# Altium footprint library Ezlo.PcbLib: 103 footprints (part 7 of 7)
Each footprint in its own frame and in the unit in brackets; x right, y up, seen from the top. Pads: shape width x height; smd on the part's side, far side on the other; paste and mask are expansions set on the pad; w line width, h text height; cw(c..) or ccw(c..) is an arc to the next point about the centre after c.
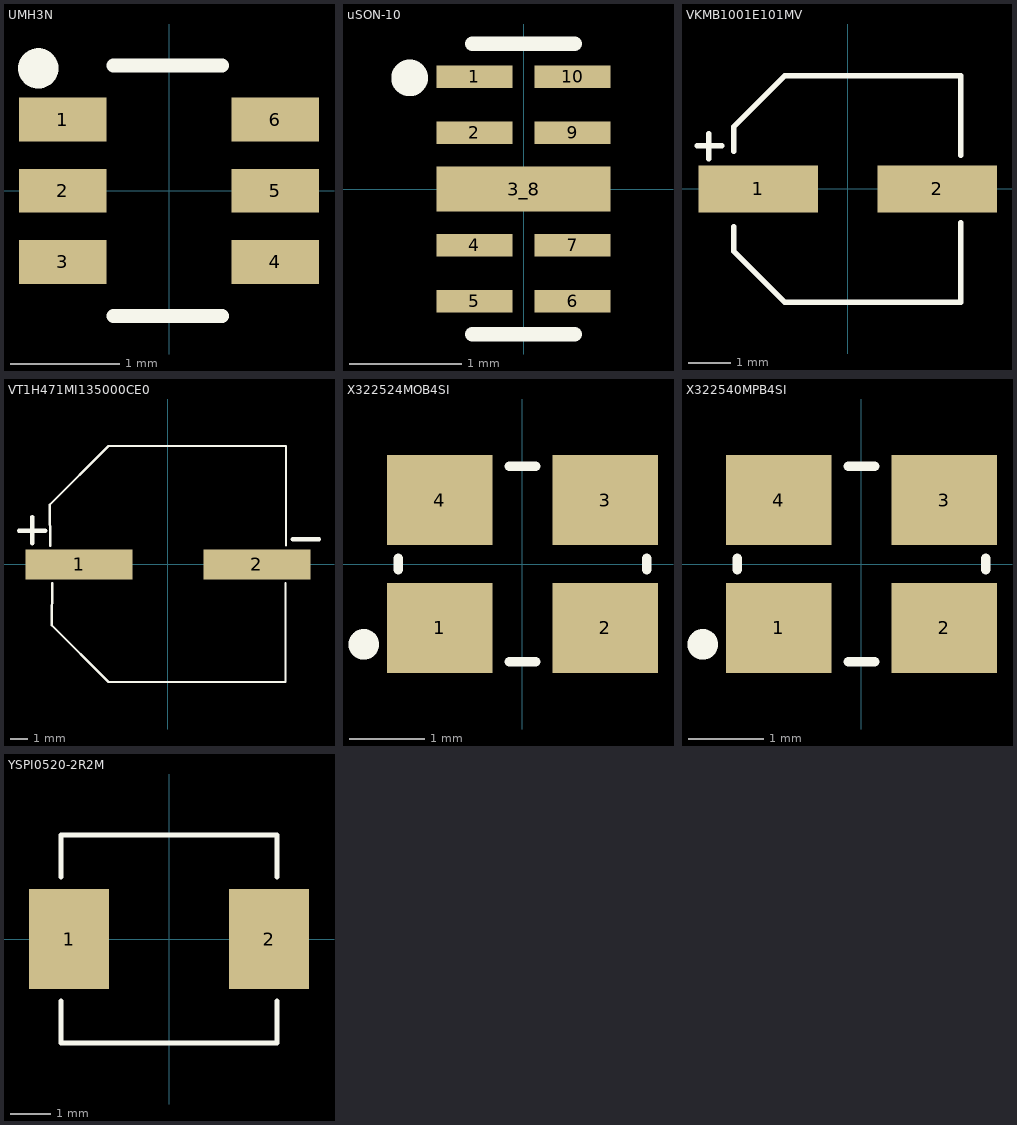
[diagram p6: the footprints below, top view; thin cyan lines are the x and y axes]

## UMH3N [mm]
pads (6):
  rect 0.8x0.4 smd: 1(-0.97,0.65) 2(-0.97,0) 3(-0.97,-0.65) 4(0.97,-0.65) 5(0.97,0) 6(0.97,0.65)
Top Overlay:
  circle w0.254: c-1.194,1.118 r0.057
  lines w0.127: -0.508,-1.143 0.483,-1.143 ; -0.508,1.143 0.483,1.143
3D body "User Library-SOT363-2.STEP": height 1.08, standoff -0.02, extent -1.2,-1.1 1.2,1.1

## uSON-10 [mm]
pads (9):
  rect 0.675x0.2 smd: 1(-0.437,1) 2(-0.437,0.5) 4(-0.437,-0.5) 5(-0.437,-1) 6(0.437,-1) 7(0.437,-0.5) 9(0.437,0.5) 10(0.437,1)
  rect 1.55x0.4 smd: 3_8(0,0)
Top Overlay:
  circle w0.254: c-1.016,0.991 r0.036
  lines w0.127: -0.457,-1.295 0.457,-1.295 ; -0.457,1.295 0.457,1.295
3D body "TPD4E05U06DQAR--3DModel-STEP-56544.STEP": height 0.55, standoff 0, extent -0.5,-1.25 0.5,1.25

## VKMB1001E101MV [mm] "25V 5mm 10mm 100uF"
pads (2):
  rect 2.8x1.1 smd: 1(-2.1,0) 2(2.1,0)
Top Overlay:
  lines w0.127: -3.531,1.016 -2.946,1.016 ; -3.251,0.711 -3.251,1.295 ; -2.667,-0.889 -2.667,-1.46 -1.478,-2.65 2.65,-2.65 2.65,-0.787 ; -2.667,0.889 -2.667,1.46 -1.478,2.65 2.65,2.65 2.65,0.787
3D body "vkmb1001e101mv_stp__C487322.stp": height 9.95, standoff -0.05, extent -3.15,-2.65 3.15,2.65

## VT1H471MI135000CE0 [mm] "470uF ±20% 50V 12.5mm 13.5mm 1000hrs 105? -40?~+105? SMD,12.5x13.5mm Aluminum Electrolytic Capacitors - SMD RoHS"
pads (2):
  rect 6.2x1.75 smd: 1(-5.145,0) 2(5.145,0)
Top Overlay:
  lines w0.127: -6.818,1.067 -6.848,3.459 -3.449,6.858 6.833,6.858 6.833,1.092 ; -6.697,-1.092 -6.728,-3.528 -3.449,-6.807 6.797,-6.807 6.797,-1.067
  lines w0.254: -8.625,1.956 -7.101,1.956 ; -7.863,1.219 -7.863,2.743 ; 7.219,1.448 8.743,1.448
3D body "EEVTG1V471UQ.stp": height 14, standoff 0, extent -7.5,-6.85 7.5,6.85

## X322524MOB4SI [mm]
pads (4):
  rect 1.4x1.2 smd: 1(-1.1,-0.85) 2(1.1,-0.85) 3(1.1,0.85) 4(-1.1,0.85)
Top Overlay:
  circle w0.254: c-2.108,-1.067 r0.076
  lines w0.127: -1.651,-0.076 -1.651,0.076 ; -0.178,-1.295 0.178,-1.295 ; -0.178,1.295 0.178,1.295 ; 1.651,-0.076 1.651,0.076
3D body "ABM8-24.000MHZ-R60-D-1-W-T.STEP": height 0.8, standoff 0, extent -1.6,-1.25 1.6,1.25

## X322540MPB4SI [mm]
pads (4):
  rect 1.4x1.2 smd: 1(-1.1,-0.85) 2(1.1,-0.85) 3(1.1,0.85) 4(-1.1,0.85)
Top Overlay:
  circle w0.254: c-2.108,-1.067 r0.076
  lines w0.127: -1.651,-0.076 -1.651,0.076 ; -0.178,-1.295 0.178,-1.295 ; -0.178,1.295 0.178,1.295 ; 1.651,-0.076 1.651,0.076
3D body "ABM8-24.000MHZ-R60-D-1-W-T.STEP": height 0.8, standoff 0, extent -1.6,-1.25 1.6,1.25

## YSPI0520-2R2M [mm]
pads (2):
  rect 2x2.5 smd: 1(-2.5,0) 2(2.5,0)
Top Overlay:
  lines w0.127: -2.7,-1.557 -2.7,-2.6 2.7,-2.6 2.7,-1.557 ; -2.7,1.557 -2.7,2.6 2.7,2.6 2.7,1.557
3D body "2008102133_YJYCOIN-YSPI0520-2R2M_C718375.STEP": height 1.8, standoff -0.2, extent -2.7,-2.6 2.7,2.6